# Altium integrated library VIETTIEN.IntLib: 173 symbols (part 7 of 8)

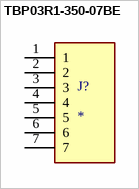
[diagram p138: symbol TBP03R1-350-07BE]

## TBP03R1-350-07BE
designator J?
2~24 Poles, Pluggable, Receptacle, Horizontal, 3.50 Pitch, Terminal Block Connector; MF: Same Sky; MP: TBP03R1-350-07BE; SnapEDA_Link: https://www.snapeda.com/parts/TBP03R1-350-07BE/Same+Sky/view-part/?ref=snap; Package: None; Value: *; Check_prices: https://www.snapeda.com/parts/TBP03R1-350-07BE/Same+Sky/view-part/?ref=eda
footprint CUI_TBP03R1-350-07BE
pins: 1, 2, 3, 4, 5, 6, 7


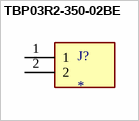
[diagram p139: symbol TBP03R2-350-02BE]

## TBP03R2-350-02BE
designator J?
2~24 Poles, Pluggable, Receptacle, Vertical, 3.50 Pitch, Terminal Block Connector; MF: Same Sky; MP: TBP03R2-350-02BE; SnapEDA_Link: https://www.snapeda.com/parts/TBP03R2-350-02BE/Same+Sky/view-part/?ref=snap; Package: None; Value: *; Check_prices: https://www.snapeda.com/parts/TBP03R2-350-02BE/Same+Sky/view-part/?ref=eda
footprint CUI_TBP03R2-350-02BE
pins: 1, 2


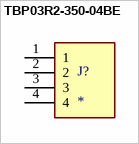
[diagram p140: symbol TBP03R2-350-04BE]

## TBP03R2-350-04BE
designator J?
2~24 Poles, Pluggable, Receptacle, Vertical, 3.50 Pitch, Terminal Block Connector; MF: Same Sky; MP: TBP03R2-350-04BE; SnapEDA_Link: https://www.snapeda.com/parts/TBP03R2-350-04BE/Same+Sky/view-part/?ref=snap; Package: None; Value: *; Check_prices: https://www.snapeda.com/parts/TBP03R2-350-04BE/Same+Sky/view-part/?ref=eda
footprint CUI_TBP03R2-350-04BE
pins: 1, 2, 3, 4


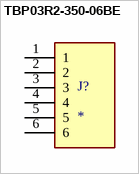
[diagram p141: symbol TBP03R2-350-06BE]

## TBP03R2-350-06BE
designator J?
2~24 Poles, Pluggable, Receptacle, Vertical, 3.50 Pitch, Terminal Block Connector; MF: Same Sky; MP: TBP03R2-350-06BE; SnapEDA_Link: https://www.snapeda.com/parts/TBP03R2-350-06BE/Same+Sky/view-part/?ref=snap; Package: None; Value: *; Check_prices: https://www.snapeda.com/parts/TBP03R2-350-06BE/Same+Sky/view-part/?ref=eda
footprint CUI_TBP03R2-350-06BE
pins: 1, 2, 3, 4, 5, 6


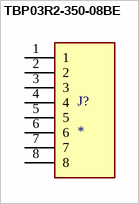
[diagram p142: symbol TBP03R2-350-08BE]

## TBP03R2-350-08BE
designator J?
2~24 Poles, Pluggable, Receptacle, Vertical, 3.50 Pitch, Terminal Block Connector; MF: Same Sky; MP: TBP03R2-350-08BE; SnapEDA_Link: https://www.snapeda.com/parts/TBP03R2-350-08BE/Same+Sky/view-part/?ref=snap; Package: None; Value: *; Check_prices: https://www.snapeda.com/parts/TBP03R2-350-08BE/Same+Sky/view-part/?ref=eda
footprint CUI_TBP03R2-350-08BE
pins: 1, 2, 3, 4, 5, 6, 7, 8


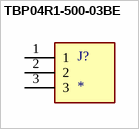
[diagram p143: symbol TBP04R1-500-03BE]

## TBP04R1-500-03BE
designator J?
Terminal Block - Domino - 3 pin; MF: Same Sky; MP: TBP04R1-500-03BE; SnapEDA_Link: https://www.snapeda.com/parts/TBP04R1-500-03BE/Same+Sky/view-part/?ref=snap; Package: None; Value: *; Check_prices: https://www.snapeda.com/parts/TBP04R1-500-03BE/Same+Sky/view-part/?ref=eda
footprint CUI_TBP04R1-500-03BE
pins: 1, 2, 3


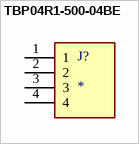
[diagram p144: symbol TBP04R1-500-04BE]

## TBP04R1-500-04BE
designator J?
2~24 Poles, Pluggable, Receptacle, Horizontal, 5.0 Pitch, Terminal Block Connector; MF: Same Sky; MP: TBP04R1-500-04BE; SnapEDA_Link: https://www.snapeda.com/parts/TBP04R1-500-04BE/Same+Sky/view-part/?ref=snap; Package: None; Value: *; Check_prices: https://www.snapeda.com/parts/TBP04R1-500-04BE/Same+Sky/view-part/?ref=eda
footprint CUI_TBP04R1-500-04BE
pins: 1, 2, 3, 4


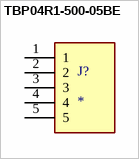
[diagram p145: symbol TBP04R1-500-05BE]

## TBP04R1-500-05BE
designator J?
2~24 Poles, Pluggable, Receptacle, Horizontal, 5.0 Pitch, Terminal Block Connector; MF: Same Sky; MP: TBP04R1-500-05BE; SnapEDA_Link: https://www.snapeda.com/parts/TBP04R1-500-05BE/Same+Sky/view-part/?ref=snap; Package: None; Value: *; Check_prices: https://www.snapeda.com/parts/TBP04R1-500-05BE/Same+Sky/view-part/?ref=eda
footprint CUI_TBP04R1-500-05BE
pins: 1, 2, 3, 4, 5


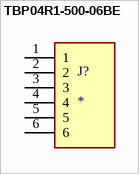
[diagram p146: symbol TBP04R1-500-06BE]

## TBP04R1-500-06BE
designator J?
2~24 Poles, Pluggable, Receptacle, Horizontal, 5.0 Pitch, Terminal Block Connector; MF: Same Sky; MP: TBP04R1-500-06BE; SnapEDA_Link: https://www.snapeda.com/parts/TBP04R1-500-06BE/Same+Sky/view-part/?ref=snap; Package: None; Value: *; Check_prices: https://www.snapeda.com/parts/TBP04R1-500-06BE/Same+Sky/view-part/?ref=eda
footprint CUI_TBP04R1-500-06BE
pins: 1, 2, 3, 4, 5, 6


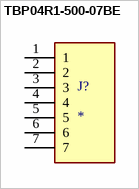
[diagram p147: symbol TBP04R1-500-07BE]

## TBP04R1-500-07BE
designator J?
2~24 Poles, Pluggable, Receptacle, Horizontal, 5.0 Pitch, Terminal Block Connector; MF: Same Sky; MP: TBP04R1-500-07BE; SnapEDA_Link: https://www.snapeda.com/parts/TBP04R1-500-07BE/Same+Sky/view-part/?ref=snap; Package: None; Value: *; Check_prices: https://www.snapeda.com/parts/TBP04R1-500-07BE/Same+Sky/view-part/?ref=eda
footprint CUI_TBP04R1-500-07BE
pins: 1, 2, 3, 4, 5, 6, 7


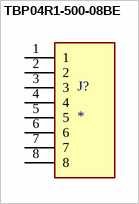
[diagram p148: symbol TBP04R1-500-08BE]

## TBP04R1-500-08BE
designator J?
2~24 Poles, Pluggable, Receptacle, Horizontal, 5.0 Pitch, Terminal Block Connector; MF: Same Sky; MP: TBP04R1-500-08BE; SnapEDA_Link: https://www.snapeda.com/parts/TBP04R1-500-08BE/Same+Sky/view-part/?ref=snap; Package: None; Value: *; Check_prices: https://www.snapeda.com/parts/TBP04R1-500-08BE/Same+Sky/view-part/?ref=eda
footprint CUI_TBP04R1-500-08BE
pins: 1, 2, 3, 4, 5, 6, 7, 8


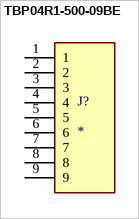
[diagram p149: symbol TBP04R1-500-09BE]

## TBP04R1-500-09BE
designator J?
2~24 Poles, Pluggable, Receptacle, Horizontal, 5.0 Pitch, Terminal Block Connector; MF: Same Sky; MP: TBP04R1-500-09BE; SnapEDA_Link: https://www.snapeda.com/parts/TBP04R1-500-09BE/Same+Sky/view-part/?ref=snap; Package: None; Value: *; Check_prices: https://www.snapeda.com/parts/TBP04R1-500-09BE/Same+Sky/view-part/?ref=eda
footprint CUI_TBP04R1-500-09BE
pins: 1, 2, 3, 4, 5, 6, 7, 8, 9


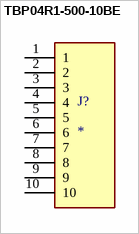
[diagram p150: symbol TBP04R1-500-10BE]

## TBP04R1-500-10BE
designator J?
2~24 Poles, Pluggable, Receptacle, Horizontal, 5.0 Pitch, Terminal Block Connector; MF: Same Sky; MP: TBP04R1-500-10BE; SnapEDA_Link: https://www.snapeda.com/parts/TBP04R1-500-10BE/Same+Sky/view-part/?ref=snap; Package: None; Value: *; Check_prices: https://www.snapeda.com/parts/TBP04R1-500-10BE/Same+Sky/view-part/?ref=eda
footprint CUI_TBP04R1-500-10BE
pins: 1, 2, 3, 4, 5, 6, 7, 8, 9, 10


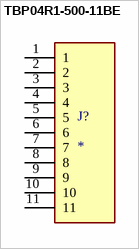
[diagram p151: symbol TBP04R1-500-11BE]

## TBP04R1-500-11BE
designator J?
2~24 Poles, Pluggable, Receptacle, Horizontal, 5.0 Pitch, Terminal Block Connector; MF: Same Sky; MP: TBP04R1-500-11BE; SnapEDA_Link: https://www.snapeda.com/parts/TBP04R1-500-11BE/Same+Sky/view-part/?ref=snap; Package: None; Value: *; Check_prices: https://www.snapeda.com/parts/TBP04R1-500-11BE/Same+Sky/view-part/?ref=eda
footprint CUI_TBP04R1-500-11BE
pins: 1, 2, 3, 4, 5, 6, 7, 8, 9, 10, 11


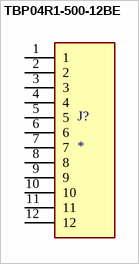
[diagram p152: symbol TBP04R1-500-12BE]

## TBP04R1-500-12BE
designator J?
2~24 Poles, Pluggable, Receptacle, Horizontal, 5.0 Pitch, Terminal Block Connector; MF: Same Sky; MP: TBP04R1-500-12BE; SnapEDA_Link: https://www.snapeda.com/parts/TBP04R1-500-12BE/Same+Sky/view-part/?ref=snap; Package: None; Value: *; Check_prices: https://www.snapeda.com/parts/TBP04R1-500-12BE/Same+Sky/view-part/?ref=eda
footprint CUI_TBP04R1-500-12BE
pins: 1, 2, 3, 4, 5, 6, 7, 8, 9, 10, 11, 12


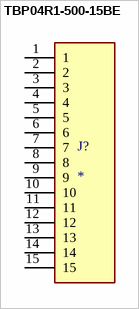
[diagram p153: symbol TBP04R1-500-15BE]

## TBP04R1-500-15BE
designator J?
2~24 Poles, Pluggable, Receptacle, Horizontal, 5.0 Pitch, Terminal Block Connector; MF: Same Sky; MP: TBP04R1-500-15BE; SnapEDA_Link: https://www.snapeda.com/parts/TBP04R1-500-15BE/Same+Sky/view-part/?ref=snap; Package: None; Value: *; Check_prices: https://www.snapeda.com/parts/TBP04R1-500-15BE/Same+Sky/view-part/?ref=eda
footprint CUI_TBP04R1-500-15BE
pins: 1, 2, 3, 4, 5, 6, 7, 8, 9, 10, 11, 12, 13, 14, 15


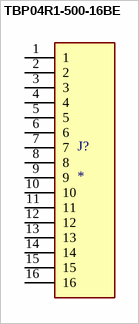
[diagram p154: symbol TBP04R1-500-16BE]

## TBP04R1-500-16BE
designator J?
2~24 Poles, Pluggable, Receptacle, Horizontal, 5.0 Pitch, Terminal Block Connector; MF: Same Sky; MP: TBP04R1-500-16BE; SnapEDA_Link: https://www.snapeda.com/parts/TBP04R1-500-16BE/Same+Sky/view-part/?ref=snap; Package: None; Value: *; Check_prices: https://www.snapeda.com/parts/TBP04R1-500-16BE/Same+Sky/view-part/?ref=eda
footprint CUI_TBP04R1-500-16BE
pins: 1, 2, 3, 4, 5, 6, 7, 8, 9, 10, 11, 12, 13, 14, 15, 16


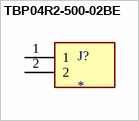
[diagram p155: symbol TBP04R2-500-02BE]

## TBP04R2-500-02BE
designator J?
2~24 Poles, Pluggable, Receptacle, Vertical, 5.0 Pitch, Terminal Block Connector; MF: Same Sky; MP: TBP04R2-500-02BE; SnapEDA_Link: https://www.snapeda.com/parts/TBP04R2-500-02BE/Same+Sky/view-part/?ref=snap; Package: None; Value: *; Check_prices: https://www.snapeda.com/parts/TBP04R2-500-02BE/Same+Sky/view-part/?ref=eda
footprint CUI_TBP04R2-500-02BE
pins: 1, 2


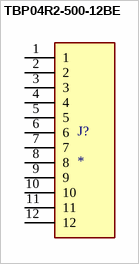
[diagram p156: symbol TBP04R2-500-12BE]

## TBP04R2-500-12BE
designator J?
2~24 Poles, Pluggable, Receptacle, Vertical, 5.0 Pitch, Terminal Block Connector; MF: Same Sky; MP: TBP04R2-500-12BE; SnapEDA_Link: https://www.snapeda.com/parts/TBP04R2-500-12BE/Same+Sky/view-part/?ref=snap; Package: None; Value: *; Check_prices: https://www.snapeda.com/parts/TBP04R2-500-12BE/Same+Sky/view-part/?ref=eda
footprint CUI_TBP04R2-500-12BE
pins: 1, 2, 3, 4, 5, 6, 7, 8, 9, 10, 11, 12


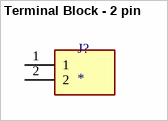
[diagram p157: symbol Terminal Block - 2 pin]

## Terminal Block - 2 pin
designator J?
Terminal Block - Domino - 2 pin; MF: Same Sky; MP: TBP04R1-500-02BE; SnapEDA_Link: https://www.snapeda.com/parts/TBP04R1-500-02BE/Same+Sky/view-part/?ref=snap; Package: None; Value: *; Check_prices: https://www.snapeda.com/parts/TBP04R1-500-02BE/Same+Sky/view-part/?ref=eda
footprint CUI_TBP04R1-500-02BE
pins: 1, 2


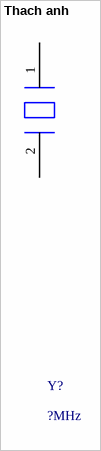
[diagram p158: symbol Thach anh]

## Thach anh
designator Y?, comment ?MHz
Crystal For all Crystal 2pin.
footprint CRY_HC_49_S
pins: 1, 2


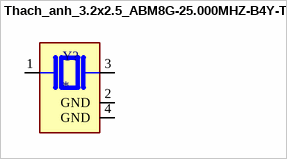
[diagram p159: symbol Thach_anh_3.2x2.5_ABM8G-25.000MHZ-B4Y-T]

## Thach_anh_3.2x2.5_ABM8G-25.000MHZ-B4Y-T
designator Y?
25 MHz Â±30ppm Crystal 10pF 60 Ohms 4-SMD, No Lead / ABM8G-25.000MHZ-B4Y-T; MF: Abracon; Value: *; SnapEDA_Link: https://www.snapeda.com/parts/ABM8G-25.000MHZ-B4Y-T/Abracon+LLC/view-part/?ref=snap; MP: ABM8G-25.000MHZ-B4Y-T; Check_prices: https://www.snapeda.com/parts/ABM8G-25.000MHZ-B4Y-T/Abracon+LLC/view-part/?ref=eda; Availability: In Stock; Price: None; Purchase-URL: https://pricing.snapeda.com/search/part/ABM8G-25.000MHZ-B4Y-T/?ref=eda; Package: SMD-4 Abracon
footprint XTAL_ABM8G-25.000MHZ-B4Y-T
pins: 1, 2 GND (power), 3 2, 4 GND (power)


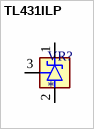
[diagram p160: symbol TL431ILP]

## TL431ILP
designator VR?
MP: TL431ILP; Package: None; Price: None; Value: *; Availability: Unavailable
footprint VREG_TL431ILP
pins: 1 CATHODE, 2 ANODE, 3 REF
